# EAGLE library part 6130XX243121_613072243121 (library WR-PHD)
WR-PHD 2.54 mm Angled Dual Socket Header Article Properties Pins 4; 6; 8; 10; 12; 14; 16; 20; 22; 24; 26; 32; 34; 40; 64; 72 Material Properties Insulator Material PBT Insulator Flammability Rating UL94 V-0 Contact Material Copper Alloy Contact Plating Gold Contact Type Stamped General Information Operating Temperature -40 °C up to +105 °C Compliance Lead free / RoHS Pitch 2.54 mm Durability 25 Mating cycles Rows Dual Gender Socket Header Type Angled Electrical Properties Withstanding Voltage 500 V (AC) Contact Resistance 20 mΩ RISO 1000 MΩ CERTIFICATION UL Approval E323964 Packaging Properties Packaging Tray <https://www.we-online.com/components/media/o33216v209%20Family_WR-PHD_6130xx243121.jpg> Details see: www.we-online.com/en/components/products/PHD_2_54_ANGLED_DUAL_SOCKET_HEADER_6130XX243121 <www.we-online.com/catalog/PHD_2_54_ANGLED_DUAL_SOCKET_HEADER_6130XX243121/?utm_source=eagle_model&utm_medium=description_link&utm_campaign=eisos_eagle> Updated by Ella 2024-03-13 2024 (C) Würth Elektronik
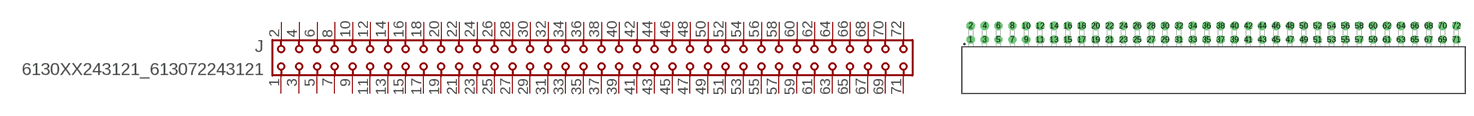
[diagram p171: symbol with the pads of 613072243121; footprint 613072243121]

Designator prefix J

## 6130XX243121_613072243121 (DATASHEET-URL: https://www.we-online.com/redexpert/spec/613072243121?ae; GENDER: Socket Header; IR: 3A; MOUNT: THT; PACKAGING: Tray; PART-NUMBER: 613072243121; PINS: 72; PITCH: 2.54 mm; ROWS: Dual; TYPE: Angled; VALUE: 613072243121)  [613072243121]
1  1  pas
2  2  pas
3  3  pas
4  4  pas
5  5  pas
6  6  pas
7  7  pas
8  8  pas
9  9  pas
10  10  pas
11  11  pas
12  12  pas
13  13  pas
14  14  pas
15  15  pas
16  16  pas
17  17  pas
18  18  pas
19  19  pas
20  20  pas
21  21  pas
22  22  pas
23  23  pas
24  24  pas
25  25  pas
26  26  pas
27  27  pas
28  28  pas
29  29  pas
30  30  pas
31  31  pas
32  32  pas
33  33  pas
34  34  pas
35  35  pas
36  36  pas
37  37  pas
38  38  pas
39  39  pas
40  40  pas
41  41  pas
42  42  pas
43  43  pas
44  44  pas
45  45  pas
46  46  pas
47  47  pas
48  48  pas
49  49  pas
50  50  pas
51  51  pas
52  52  pas
53  53  pas
54  54  pas
55  55  pas
56  56  pas
57  57  pas
58  58  pas
59  59  pas
60  60  pas
61  61  pas
62  62  pas
63  63  pas
64  64  pas
65  65  pas
66  66  pas
67  67  pas
68  68  pas
69  69  pas
70  70  pas
71  71  pas
72  72  pas

## Footprint 613072243121 (pad centres in mm)
WR-PHD 2.54 mm Angled Socket Header, 72 Pins
drill 1.02: 1 -44.45,5.61; 2 -44.45,8.15; 3 -41.91,5.61; 4 -41.91,8.15; 5 -39.37,5.61; 6 -39.37,8.15; 7 -36.83,5.61; 8 -36.83,8.15; 9 -34.29,5.61; 10 -34.29,8.15; 11 -31.75,5.61; 12 -31.75,8.15; 13 -29.21,5.61; 14 -29.21,8.15; 15 -26.67,5.61; 16 -26.67,8.15; 17 -24.13,5.61; 18 -24.13,8.15; 19 -21.59,5.61; 20 -21.59,8.15; 21 -19.05,5.61; 22 -19.05,8.15; 23 -16.51,5.61; 24 -16.51,8.15; 25 -13.97,5.61; 26 -13.97,8.15; 27 -11.43,5.61; 28 -11.43,8.15; 29 -8.89,5.61; 30 -8.89,8.15; 31 -6.35,5.61; 32 -6.35,8.15; 33 -3.81,5.61; 34 -3.81,8.15; 35 -1.27,5.61; 36 -1.27,8.15; 37 1.27,5.61; 38 1.27,8.15; 39 3.81,5.61; 40 3.81,8.15; 41 6.35,5.61; 42 6.35,8.15; 43 8.89,5.61; 44 8.89,8.15; 45 11.43,5.61; 46 11.43,8.15; 47 13.97,5.61; 48 13.97,8.15; 49 16.51,5.61; 50 16.51,8.15; 51 19.05,5.61; 52 19.05,8.15; 53 21.59,5.61; 54 21.59,8.15; 55 24.13,5.61; 56 24.13,8.15; 57 26.67,5.61; 58 26.67,8.15; 59 29.21,5.61; 60 29.21,8.15; 61 31.75,5.61; 62 31.75,8.15; 63 34.29,5.61; 64 34.29,8.15; 65 36.83,5.61; 66 36.83,8.15; 67 39.37,5.61; 68 39.37,8.15; 69 41.91,5.61; 70 41.91,8.15; 71 44.45,5.61; 72 44.45,8.15